# Altium footprint library xponent.PcbLib: 15 footprints
Each footprint in its own frame and in the unit in brackets; x right, y up, seen from the top. Pads: shape width x height; smd on the part's side, far side on the other; paste and mask are expansions set on the pad; w line width, h text height; cw(c..) or ccw(c..) is an arc to the next point about the centre after c.
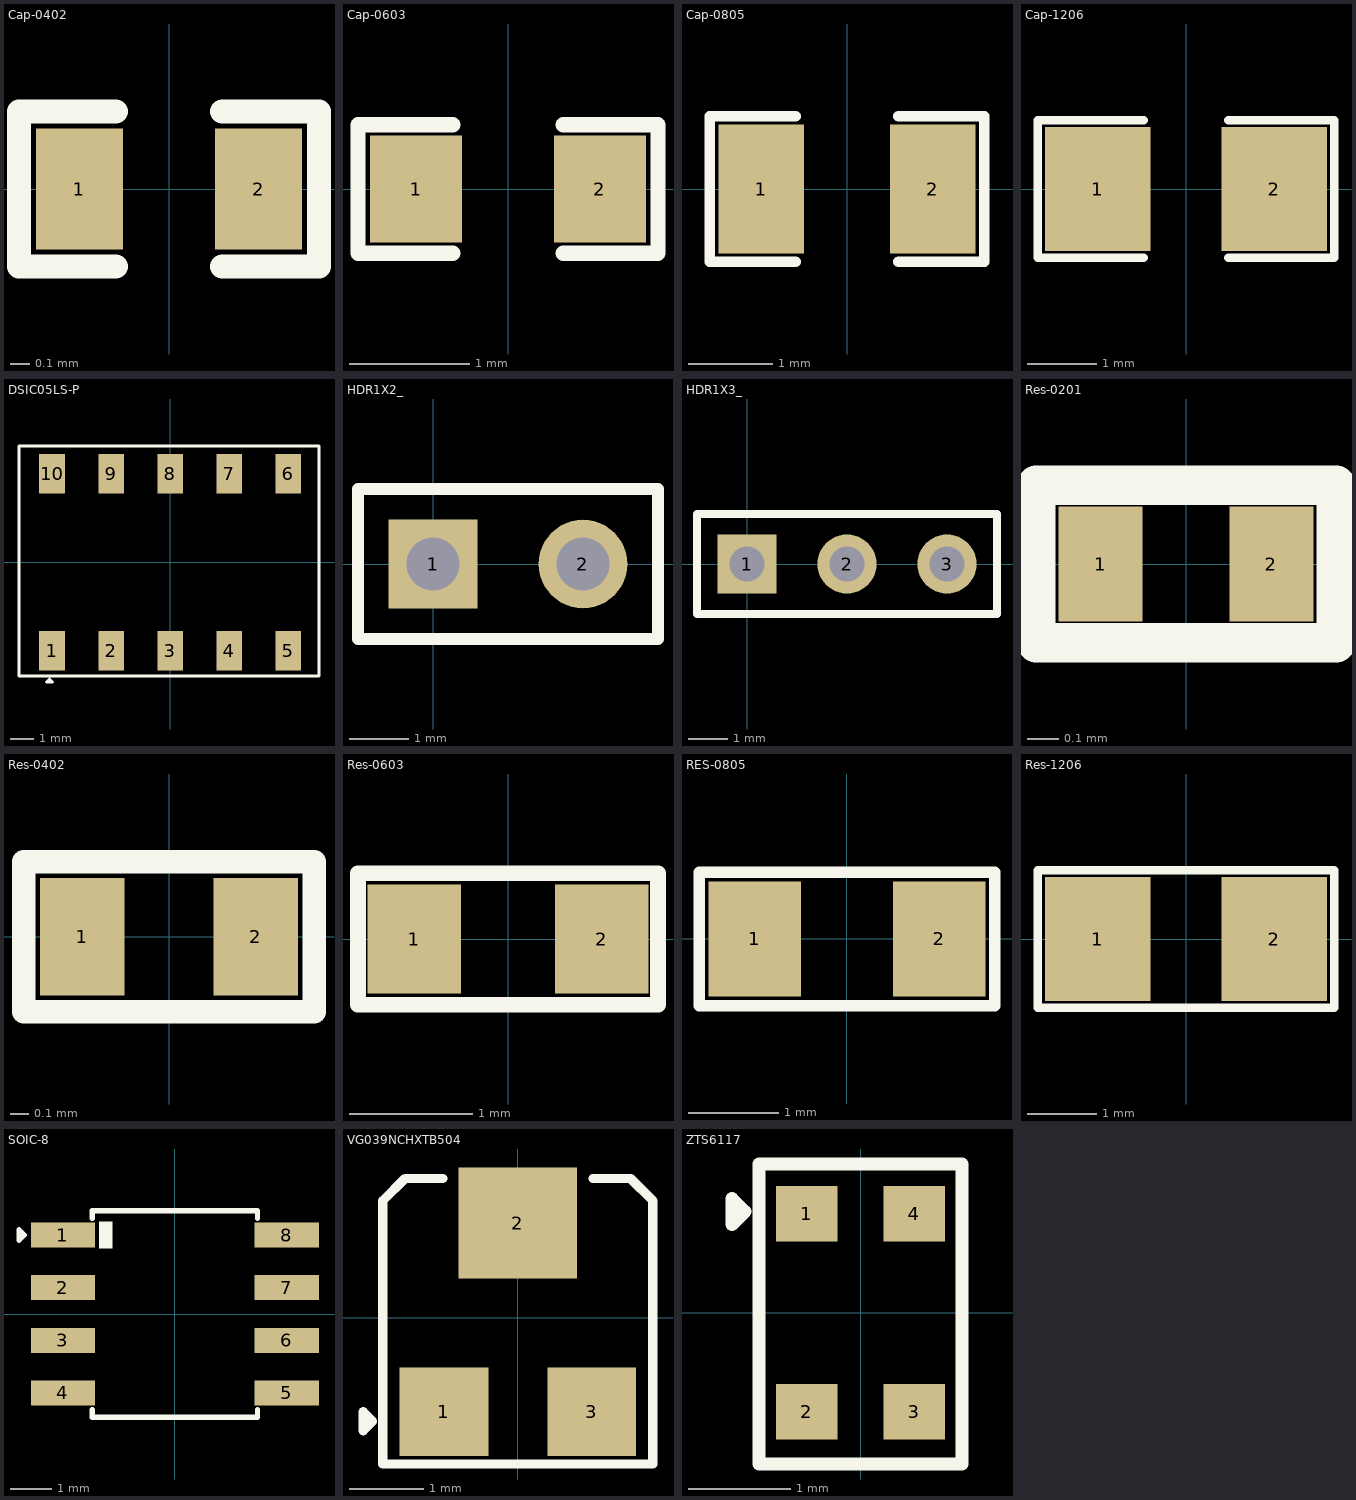
[diagram p0: the footprints below, top view; thin cyan lines are the x and y axes]

## Cap-0402 [mil]
pads (2):
  rect 18x25 smd mask+2.36: 1(-18.5,0) 2(18.5,0)
Top Overlay:
  lines w5: -11,-16 -31,-16 -31,16 -11,16 ; 11,-16 31,-16 31,16 11,16
3D body "User Library-Capacitor 0402.step": height 18.5, standoff -1.18, extent -19.68,-9.84 19.7,9.85

## Cap-0603 [mil]
pads (2):
  rect 30x35 smd mask+2.36: 1(-30,0) 2(30,0)
Top Overlay:
  lines w5: -18,-21 -49,-21 -49,21 -18,21 ; 18,-21 49,-21 49,21 18,21
3D body "User Library-CAPC1608X09.step": height 34.25, standoff -1.18, extent -31.51,-15.75 31.49,15.74

## Cap-0805 [mil] "SMD 0805"
pads (2):
  rect 40x60 smd mask+2.76: 1(-40,0) 2(40,0)
Top Overlay:
  lines w5: -24,-34 -64,-34 -64,34 -24,34 ; 24,-34 64,-34 64,34 24,34
3D body "User Library-0805 SMD Capacitor.step": height 30, standoff -0.79, extent -39.36,-24.6 39.38,24.61

## Cap-1206 [mil] "SMD 1206"
pads (2):
  rect 60x70 smd: 1(-50,0) 2(50,0)
Top Overlay:
  lines w5: -24,-39 -84,-39 -84,39 -24,39 ; 24,-39 84,-39 84,39 24,39
3D body "User Library-1206 SMD Capacitor.step": height 39.45, standoff 0, extent -62.96,-31.46 63.03,31.53

## DSIC05LS-P [mm]
pads (10):
  rect 1.1x1.7 smd: 1(-5.08,-3.8) 2(-2.54,-3.8) 3(0,-3.8) 4(2.54,-3.8) 5(5.08,-3.8) 6(5.08,3.8) 7(2.54,3.8) 8(0,3.8) 9(-2.54,3.8) 10(-5.08,3.8)
Top Overlay:
  lines w0.127: -6.5,-4.9 -6.5,5 6.4,5 6.4,-4.9 -6.5,-4.9 ; -5.313,-5.154 -5.059,-5.154 -5.186,-5.027 -5.313,-5.154
3D body "DSIC05LS-P.STEP": height 3.95, standoff -0.2, extent -6.374,-4.88 6.326,4.88

## HDR1X2_ [mm] "CONN HEADER VERT 2POS 2.54MM"
pads (2):
  rect 1.5x1.5 hole 0.9: 1(0,0)
  round 1.5 hole 0.9: 2(2.54,0)
Top Overlay:
  lines w0.2: -1.27,-1.27 -1.27,1.27 3.81,1.27 3.81,-1.27 -1.27,-1.27
3D body "User Library-Header1x2.STEP": height 8.44, standoff -2.54, extent -1.27,-1.27 3.81,1.27

## HDR1X3_ [mm] "Connector; Header; 3 Position"
pads (3):
  rect 1.5x1.5 hole 0.9: 1(0,0)
  round 1.5 hole 0.9: 2(2.54,0) 3(5.08,0)
Top Overlay:
  lines w0.2: -1.27,-1.27 6.35,-1.27 6.35,1.27 -1.27,1.27 -1.27,-1.27
3D body "User Library-Header_Male_3Pin.STEP": height 8.54, standoff -3, extent -1.27,-1.245 6.35,1.245

## Res-0201 [mm]
pads (2):
  rect 0.27x0.37 smd mask+0.055: 1(-0.275,0) 2(0.275,0)
Top Overlay:
  lines w0.127: -0.483,-0.254 -0.483,0.254 0.483,0.254 0.483,-0.254 -0.483,-0.254
3D body "User Library-0201(0603M) Res.step": height 0.29, standoff -0.02, extent -0.305,-0.152 0.305,0.153

## Res-0402 [mil]
pads (2):
  rect 18x25 smd mask+2.17: 1(-18.5,0) 2(18.5,0)
Top Overlay:
  lines w0.13: -32,-17 32,-17
  lines w5: -31,-16 31,-16 31,16 -31,16 -31,-16
3D body "User Library-RES_1005-0402.step": height 16.14, standoff 0, extent -22.63,-10.82 22.64,10.83

## Res-0603 [mil]
pads (2):
  rect 30x35 smd: 1(-30,0) 2(30,0)
Top Overlay:
  lines w5: -48,-21 -48,21 48,21 48,-21 -48,-21
3D body "User Library-RESC1608X05N.step": height 17.76, standoff 0, extent -30.52,-16.74 30.51,16.73

## RES-0805 [mil] "SMD 0805"
pads (2):
  rect 40x50 smd: 1(-40,0) 2(40,0)
Top Overlay:
  lines w5: -64,-29 -64,29 64,29 64,-29 -64,-29
3D body "User Library-CR2012-0805.STEP": height 23.62, standoff 0, extent -39.34,-24.75 39.4,24.46

## Res-1206 [mil]
pads (2):
  rect 60x70 smd: 1(-50,0) 2(50,0)
Top Overlay:
  lines w5: -84,-39 84,-39 84,39 -84,39 -84,-39
3D body "User Library-1206 SMD Resistor.step": height 39.45, standoff 0, extent -62.99,-31.49 63,31.51

## SOIC-8 [mm]
pads (8):
  rect 1.55x0.6 smd: 1(-2.7,1.905) 2(-2.7,0.635) 3(-2.7,-0.635) 4(-2.7,-1.905) 5(2.7,-1.905) 6(2.7,-0.635) 7(2.7,0.635) 8(2.7,1.905)
Top Overlay:
  rectangle: -1.829,1.575 -1.499,2.235
  lines w0.127: -1.991,-2.311 -1.991,-2.489 1.991,-2.489 1.991,-2.311 ; -1.991,2.311 -1.991,2.489 1.991,2.489 1.991,2.311 ; -3.759,1.778 -3.632,1.905 -3.759,2.032 -3.759,1.778
3D body "User Library-SOIC-8-1.STEP": height 1.7, standoff -0.05, extent -3,-2.45 3,2.45

## VG039NCHXTB504 [mm]
pads (3):
  rect 1.2x1.2 smd: 1(-1,-1.275) 3(1,-1.275)
  rect 1.6x1.5 smd: 2(0,1.275)
Top Overlay:
  lines w0.127: -1.016,1.88 -1.524,1.88 -1.826,1.578 -1.826,-1.98 1.826,-1.98 1.826,1.578 1.524,1.88 1.016,1.88 ; -2.092,-1.529 -1.965,-1.402 -2.092,-1.275 -2.092,-1.529
3D body "TC-33X-2.stp": height 1.13, standoff -0.02, extent -1.76,-1.915 1.84,2.047

## ZTS6117 [mm]
pads (4):
  rect 0.6x0.54 smd: 1(-0.525,0.965) 2(-0.525,-0.965) 3(0.525,-0.965) 4(0.525,0.965)
Top Overlay:
  lines w0.127: -0.991,1.422 -0.991,-1.472 0.991,-1.472 ; -0.991,1.449 0.989,1.449 0.991,1.448 0.991,-1.473 ; -1.254,0.859 -1.254,1.113 -1.127,0.986 -1.254,0.859
3D body "ZTS6117.STEP": height 0.9, standoff -0.01, extent -0.921,-1.375 0.929,1.375